# Altium footprint library WE-CMBNC.PcbLib: 45 footprints (part 3 of 3)
Each footprint in its own frame and in the unit in brackets; x right, y up, seen from the top. Pads: shape width x height; smd on the part's side, far side on the other; paste and mask are expansions set on the pad; w line width, h text height; cw(c..) or ccw(c..) is an arc to the next point about the centre after c.
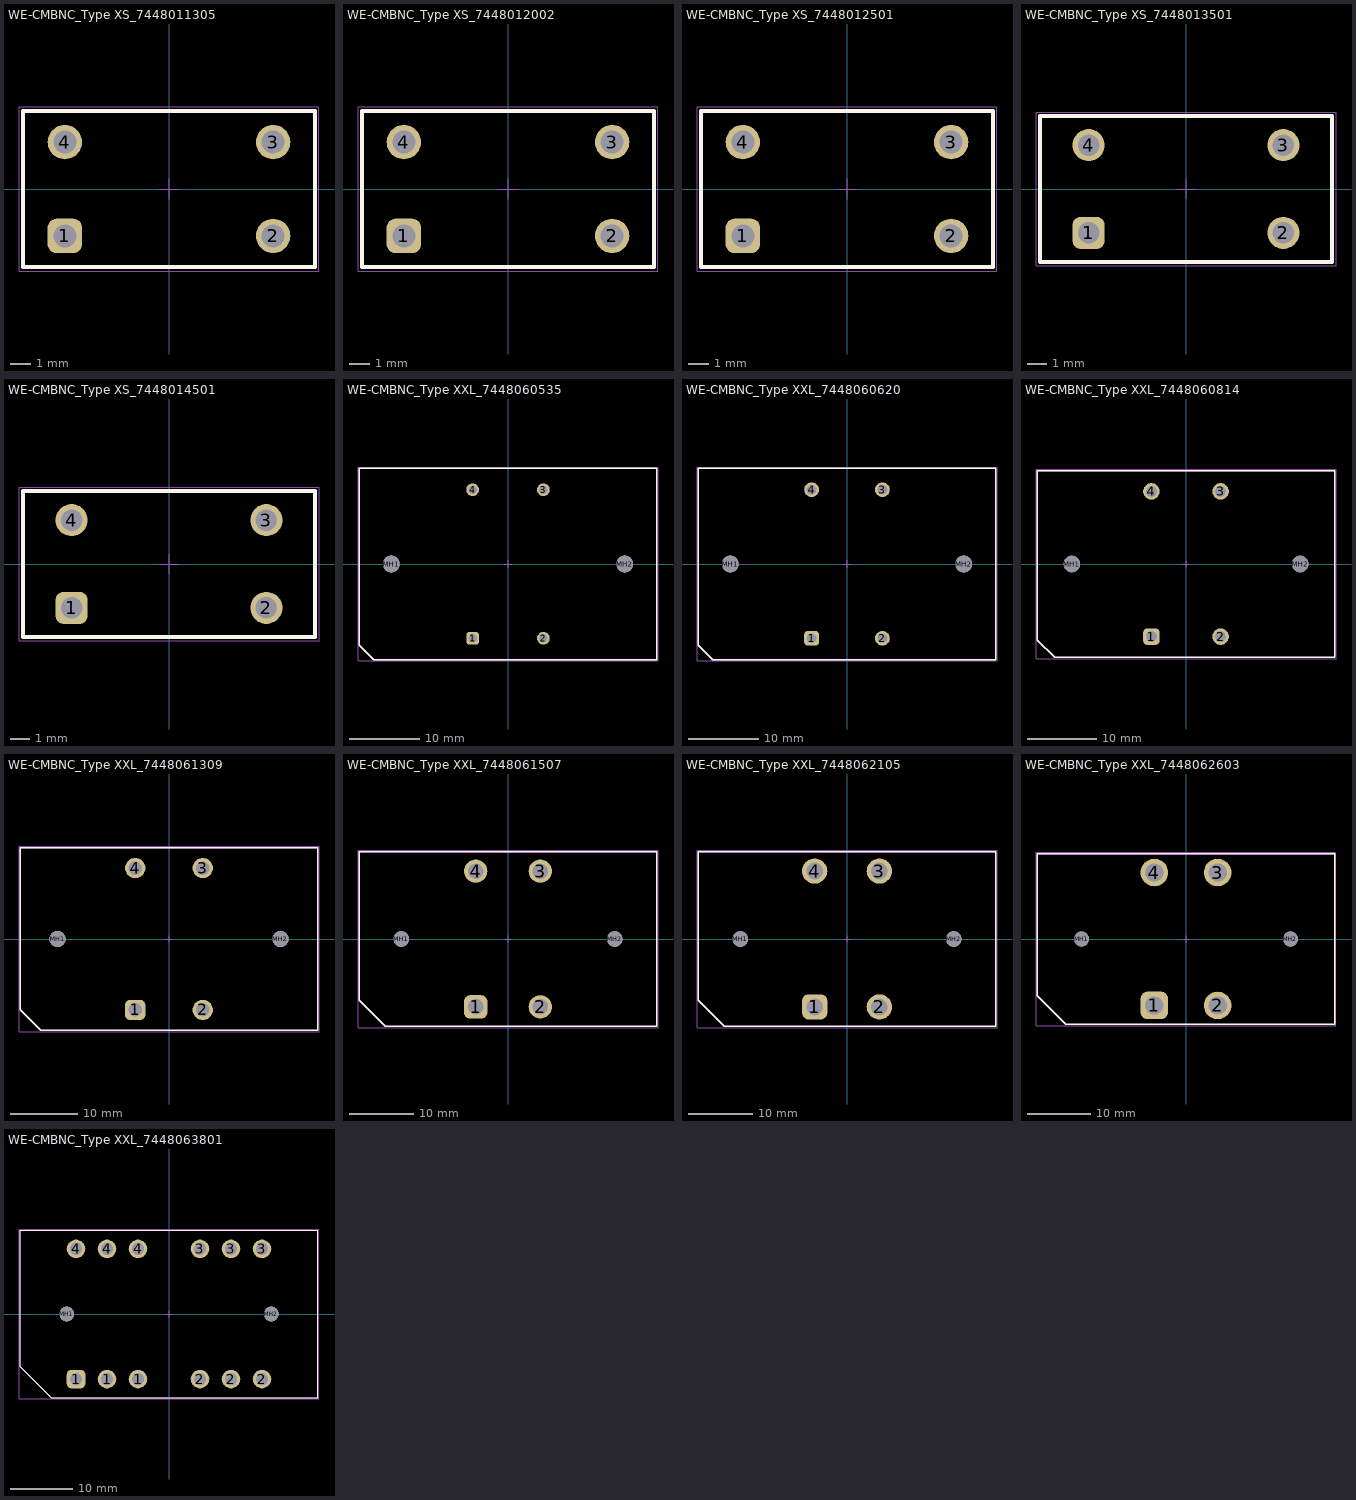
[diagram p2: the footprints below, top view; thin cyan lines are the x and y axes]

## WE-CMBNC_Type XS_7448011305 [mm] "THT Common Mode Power Line Choke, 4 leads, body 14x7.5mm"
height 16
pads (4):
  rrect50% 1.65x1.65 hole 1.1: 1(-5,-2.25)
  round 1.65 hole 1.1: 2(5,-2.25) 3(5,2.25) 4(-5,2.25)
Top Overlay:
  lines w0.2: -7,-3.75 7,-3.75 7,3.75 -7,3.75 -7,-3.75
Top Designator:
  text ".Designator" at -7.498,-0.5 h1.5
Top Component Outline:
  lines w0.1: -7,-3.75 -7,3.75 7,3.75 7,-3.75 -7,-3.75
Top Courtyard:
  lines w0.05: -7.2,-3.95 7.2,-3.95 7.2,3.95 -7.2,3.95 -7.2,-3.95
Top Component Center:
  lines w0.05: -0.5,0 0.5,0 ; 0,-0.5 0,0.5
3D body "7448011305.stp": height 14.66, standoff -2.95, extent -6.324,-3.5 6.324,3.616

## WE-CMBNC_Type XS_7448012002 [mm] "THT Common Mode Power Line Choke, 4 leads, body 14x7.5mm"
height 16
pads (4):
  rrect50% 1.65x1.65 hole 1.1: 1(-5,-2.25)
  round 1.65 hole 1.1: 2(5,-2.25) 3(5,2.25) 4(-5,2.25)
Top Overlay:
  lines w0.2: -7,-3.75 -7,3.75 7,3.75 7,-3.75 -7,-3.75
Top Designator:
  text ".Designator" at -7.498,-0.5 h1.5
Top Component Outline:
  lines w0.1: -7,-3.75 7,-3.75 7,3.75 -7,3.75 -7,-3.75
Top Courtyard:
  lines w0.05: -7.2,-3.95 -7.2,3.95 7.2,3.95 7.2,-3.95 -7.2,-3.95
Top Component Center:
  lines w0.05: -0.5,0 0.5,0 ; 0,-0.5 0,0.5
3D body "7448012002.stp": height 14.66, standoff -2.95, extent -6.101,-3.5 6.101,3.636

## WE-CMBNC_Type XS_7448012501 [mm] "THT Common Mode Power Line Choke, 4 leads, body 14x7.5mm"
height 16
pads (4):
  rrect50% 1.65x1.65 hole 1.1: 1(-5,-2.25)
  round 1.65 hole 1.1: 2(5,-2.25) 3(5,2.25) 4(-5,2.25)
Top Overlay:
  lines w0.2: -7,-3.75 -7,3.75 7,3.75 7,-3.75 -7,-3.75
Top Designator:
  text ".Designator" at -7.498,-0.5 h1.5
Top Component Outline:
  lines w0.1: -7,-3.75 7,-3.75 7,3.75 -7,3.75 -7,-3.75
Top Courtyard:
  lines w0.05: -7.2,-3.95 -7.2,3.95 7.2,3.95 7.2,-3.95 -7.2,-3.95
Top Component Center:
  lines w0.05: -0.5,0 0.5,0 ; 0,-0.5 0,0.5
3D body "7448012501.stp": height 14.66, standoff -2.95, extent -6.145,-3.5 6.144,3.684

## WE-CMBNC_Type XS_7448013501 [mm] "THT Common Mode Power Line Choke, 4 leads, body 15x7.5mm"
height 16
pads (4):
  rrect50% 1.65x1.65 hole 1.1: 1(-5,-2.25)
  round 1.65 hole 1.1: 2(5,-2.25) 3(5,2.25) 4(-5,2.25)
Top Overlay:
  lines w0.2: -7.5,-3.75 -7.5,3.75 7.5,3.75 7.5,-3.75 -7.5,-3.75
Top Designator:
  text ".Designator" at -7.498,-0.5 h1.5
Top Component Outline:
  lines w0.1: -7.5,-3.75 7.5,-3.75 7.5,3.75 -7.5,3.75 -7.5,-3.75
Top Courtyard:
  lines w0.05: -7.7,-3.95 -7.7,3.95 7.7,3.95 7.7,-3.95 -7.7,-3.95
Top Component Center:
  lines w0.05: -0.5,0 0.5,0 ; 0,-0.5 0,0.5
3D body "7448013501.stp": height 14.66, standoff -2.95, extent -6.255,-3.545 6.255,3.5

## WE-CMBNC_Type XS_7448014501 [mm] "THT Common Mode Power Line Choke, 4 leads, body 15x7.5mm"
height 16
pads (4):
  rrect50% 1.65x1.65 hole 1.1: 1(-5,-2.25)
  round 1.65 hole 1.1: 2(5,-2.25) 3(5,2.25) 4(-5,2.25)
Top Overlay:
  lines w0.2: -7.5,-3.75 7.5,-3.75 7.5,3.75 -7.5,3.75 -7.5,-3.75
Top Designator:
  text ".Designator" at -7.498,-0.5 h1.5
Top Component Outline:
  lines w0.1: -7.5,-3.75 -7.5,3.75 7.5,3.75 7.5,-3.75 -7.5,-3.75
Top Courtyard:
  lines w0.05: -7.7,-3.95 7.7,-3.95 7.7,3.95 -7.7,3.95 -7.7,-3.95
Top Component Center:
  lines w0.05: -0.5,0 0.5,0 ; 0,-0.5 0,0.5
3D body "7448014501.stp": height 14.66, standoff -3.95, extent -6.28,-3.5 6.28,3.756

## WE-CMBNC_Type XXL_7448060535 [mm] "THT Common Mode Power Line Choke, 4 leads, body 42x27mm"
height 46
pads (6):
  rrect50% 1.8x1.8 hole 1.2: 1(-5,-10.5)
  round 1.8 hole 1.2: 2(5,-10.5) 3(5,10.5) 4(-5,10.5)
  round 2.4 hole 2.4 unplated: MH1(-16.5,0) MH2(16.5,0)
Top Overlay:
  lines w0.2: -21,-11.5 -19,-13.5 21,-13.5 21,13.5 -21,13.5 -21,-11.5
Top Designator:
  text ".Designator" at -7.498,-0.5 h1.5
Top Component Outline:
  lines w0.1: -21,-11.5 -21,13.5 21,13.5 21,-13.5 -19,-13.5 -21,-11.5
Top Courtyard:
  lines w0.05: -21.2,-13.7 -21.2,13.7 21.2,13.7 21.2,-13.7 -21.2,-13.7
Top Component Center:
  lines w0.05: -0.5,0 0.5,0 ; 0,-0.5 0,0.5
3D body "7448060535_Rev1.1.stp": height 42.03, standoff -4.8, extent -20.547,-13.25 20.547,13.25

## WE-CMBNC_Type XXL_7448060620 [mm] "THT Common Mode Power Line Choke, 4 leads, body 42x27mm"
height 46
pads (6):
  rrect50% 2.1x2.1 hole 1.4: 1(-5,-10.5)
  round 2.1 hole 1.4: 2(5,-10.5) 3(5,10.5) 4(-5,10.5)
  round 2.4 hole 2.4 unplated: MH1(-16.5,0) MH2(16.5,0)
Top Overlay:
  lines w0.2: -21,-11.5 -21,13.5 21,13.5 21,-13.5 -19,-13.5 -21,-11.5
Top Designator:
  text ".Designator" at -7.498,-0.5 h1.5
Top Component Outline:
  lines w0.1: -21,-11.5 -19,-13.5 21,-13.5 21,13.5 -21,13.5 -21,-11.5
Top Courtyard:
  lines w0.05: -21.2,-13.7 21.2,-13.7 21.2,13.7 -21.2,13.7 -21.2,-13.7
Top Component Center:
  lines w0.05: -0.5,0 0.5,0 ; 0,-0.5 0,0.5
3D body "7448060620_Rev1.1.stp": height 39.78, standoff -4.77, extent -20.998,-13.25 20.998,13.25

## WE-CMBNC_Type XXL_7448060814 [mm] "THT Common Mode Power Line Choke, 4 leads, body 43x27mm"
height 46
pads (6):
  rrect50% 2.4x2.4 hole 1.6: 1(-5,-10.5)
  round 2.4 hole 1.6: 2(5,-10.5) 3(5,10.5) 4(-5,10.5)
  round 2.4 hole 2.4 unplated: MH1(-16.5,0) MH2(16.5,0)
Top Overlay:
  lines w0.2: -21.5,-11 -19,-13.5 21.5,-13.5 21.5,13.5 -21.5,13.5 -21.5,-11
Top Designator:
  text ".Designator" at -7.498,-0.5 h1.5
Top Component Outline:
  lines w0.1: -21.5,-11 -21.5,13.5 21.5,13.5 21.5,-13.5 -19,-13.5 -21.5,-11
Top Courtyard:
  lines w0.05: -21.7,-13.7 21.7,-13.7 21.7,13.7 -21.7,13.7 -21.7,-13.7
Top Component Center:
  lines w0.05: -0.5,0 0.5,0 ; 0,-0.5 0,0.5
3D body "7448060814_Rev1.1.stp": height 40.65, standoff -4.8, extent -21.499,-13.25 21.499,13.25

## WE-CMBNC_Type XXL_7448061309 [mm] "THT Common Mode Power Line Choke, 4 leads, body 44x27mm"
height 46
pads (6):
  rrect50% 3x3 hole 2: 1(-5,-10.5)
  round 3 hole 2: 2(5,-10.5) 3(5,10.5) 4(-5,10.5)
  round 2.4 hole 2.4 unplated: MH1(-16.5,0) MH2(16.5,0)
Top Overlay:
  lines w0.2: -22,-10.5 -22,13.5 22,13.5 22,-13.5 -19,-13.5 -22,-10.5
Top Designator:
  text ".Designator" at -7.498,-0.5 h1.5
Top Component Outline:
  lines w0.1: -22,-10.5 -19,-13.5 22,-13.5 22,13.5 -22,13.5 -22,-10.5
Top Courtyard:
  lines w0.05: -22.2,-13.7 22.2,-13.7 22.2,13.7 -22.2,13.7 -22.2,-13.7
Top Component Center:
  lines w0.05: -0.5,0 0.5,0 ; 0,-0.5 0,0.5
3D body "7448061309_Rev1.1.stp": height 40.55, standoff -4.9, extent -21.91,-13.25 21.908,13.25

## WE-CMBNC_Type XXL_7448061507 [mm] "THT Common Mode Power Line Choke, 4 leads, body 46x27mm"
height 46
pads (6):
  rrect50% 3.6x3.6 hole 2.4: 1(-5,-10.5)
  round 3.6 hole 2.4: 2(5,-10.5) 3(5,10.5) 4(-5,10.5)
  round 2.4 hole 2.4 unplated: MH1(-16.5,0) MH2(16.5,0)
Top Overlay:
  lines w0.2: -23,-9.5 -23,13.5 23,13.5 23,-13.5 -19,-13.5 -23,-9.5
Top Designator:
  text ".Designator" at -7.498,-0.5 h1.5
Top Component Outline:
  lines w0.1: -23,-9.5 -19,-13.5 23,-13.5 23,13.5 -23,13.5 -23,-9.5
Top Courtyard:
  lines w0.05: -23.2,-13.7 -23.2,13.7 23.2,13.7 23.2,-13.7 -23.2,-13.7
Top Component Center:
  lines w0.05: -0.5,0 0.5,0 ; 0,-0.5 0,0.5
3D body "7448061507_Rev1.1.stp": height 42.68, standoff -4.8, extent -22.56,-13.25 22.56,13.25

## WE-CMBNC_Type XXL_7448062105 [mm] "THT Common Mode Power Line Choke, 4 leads, body 46x27mm"
height 46
pads (6):
  rrect50% 3.9x3.9 hole 2.6: 1(-5,-10.5)
  round 3.9 hole 2.6: 2(5,-10.5) 3(5,10.5) 4(-5,10.5)
  round 2.4 hole 2.4 unplated: MH1(-16.5,0) MH2(16.5,0)
Top Overlay:
  lines w0.2: -23,-9.5 -23,13.5 23,13.5 23,-13.5 -19,-13.5 -23,-9.5
Top Designator:
  text ".Designator" at -7.498,-0.5 h1.5
Top Component Outline:
  lines w0.1: -23,-9.5 -19,-13.5 23,-13.5 23,13.5 -23,13.5 -23,-9.5
Top Courtyard:
  lines w0.05: -23.2,-13.7 -23.2,13.7 23.2,13.7 23.2,-13.7 -23.2,-13.7
Top Component Center:
  lines w0.05: -0.5,0 0.5,0 ; 0,-0.5 0,0.5
3D body "7448062105_Rev1.1.stp": height 42.78, standoff -4.8, extent -22.548,-13.25 22.548,13.25

## WE-CMBNC_Type XXL_7448062603 [mm] "THT Common Mode Power Line Choke, 4 leads, body 47x27mm"
height 46
pads (6):
  rrect50% 4.35x4.35 hole 2.9: 1(-5,-10.5)
  round 4.35 hole 2.9: 2(5,-10.5) 3(5,10.5) 4(-5,10.5)
  round 2.4 hole 2.4 unplated: MH1(-16.5,0) MH2(16.5,0)
Top Overlay:
  lines w0.2: -23.5,-9 -19,-13.5 23.5,-13.5 23.5,13.5 -23.5,13.5 -23.5,-9
Top Designator:
  text ".Designator" at -7.498,-0.5 h1.5
Top Component Outline:
  lines w0.1: -23.5,-9 -23.5,13.5 23.5,13.5 23.5,-13.5 -19,-13.5 -23.5,-9
Top Courtyard:
  lines w0.05: -23.7,-13.7 -23.7,13.7 23.7,13.7 23.7,-13.7 -23.7,-13.7
Top Component Center:
  lines w0.05: -0.5,0 0.5,0 ; 0,-0.5 0,0.5
3D body "7448062603_Rev1.1.stp": height 40.65, standoff -4.8, extent -22.962,-13.55 22.961,13.55

## WE-CMBNC_Type XXL_7448063801 [mm] "THT Common Mode Power Line Choke, 12 leads, body 48x27"
height 46
pads (14):
  rrect50% 3x3 hole 2: 1(-15,-10.5)
  round 3 hole 2: 1(-10,-10.5) 1(-5,-10.5) 2(5,-10.5) 2(10,-10.5) 2(15,-10.5) 3(5,10.5) 3(10,10.5) 3(15,10.5) 4(-15,10.5) 4(-10,10.5) 4(-5,10.5)
  round 2.4 hole 2.4 unplated: MH1(-16.5,0) MH2(16.5,0)
Top Overlay:
  lines w0.2: -24,-8.5 -24,13.5 24,13.5 24,-13.5 -19,-13.5 -24,-8.5
Top Designator:
  text ".Designator" at -7.498,-0.5 h1.5
Top Component Outline:
  lines w0.1: -24,-8.5 -19,-13.5 24,-13.5 24,13.5 -24,13.5 -24,-8.5
Top Courtyard:
  lines w0.05: -24.2,-13.7 24.2,-13.7 24.2,13.7 -24.2,13.7 -24.2,-13.7
Top Component Center:
  lines w0.05: -0.5,0 0.5,0 ; 0,-0.5 0,0.5
3D body "7448063801_tri_Rev1.1.stp": height 39.99, standoff -4.83, extent -22.049,-14.261 22.049,13.25